# Altium schematic symbol library 1771004.SchLib: 1 symbol
Pins are listed as number, name and electrical type; pins without a type are passive.

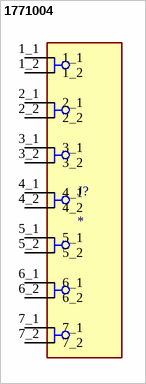
[diagram p0: symbol 1771004]

## 1771004
designator J?
PCB Terminal Push-In 2.5mm 20AWG 160V 6A 7 Position COMBICON PTSM Series | Phoenix Contact 1771004; MPN: 1771004; DATASHEET_URL: https://s3.amazonaws.com/snapeda/datasheet/1771004_Phoenix_Contact.pdf; SOURCE_URL: https://www.snapeda.com/parts/1771004/Phoenix+Contact/view-part/; Value: *; MANUFACTURER: Phoenix Contact
footprint PHOENIX_1771004
pins: 1_1, 1_2, 2_1, 2_2, 3_1, 3_2, 4_1, 4_2, 5_1, 5_2, 6_1, 6_2, 7_1, 7_2